# Altium schematic symbol library Schlib.SchLib: 18 symbols
Pins are listed as number, name and electrical type; pins without a type are passive.

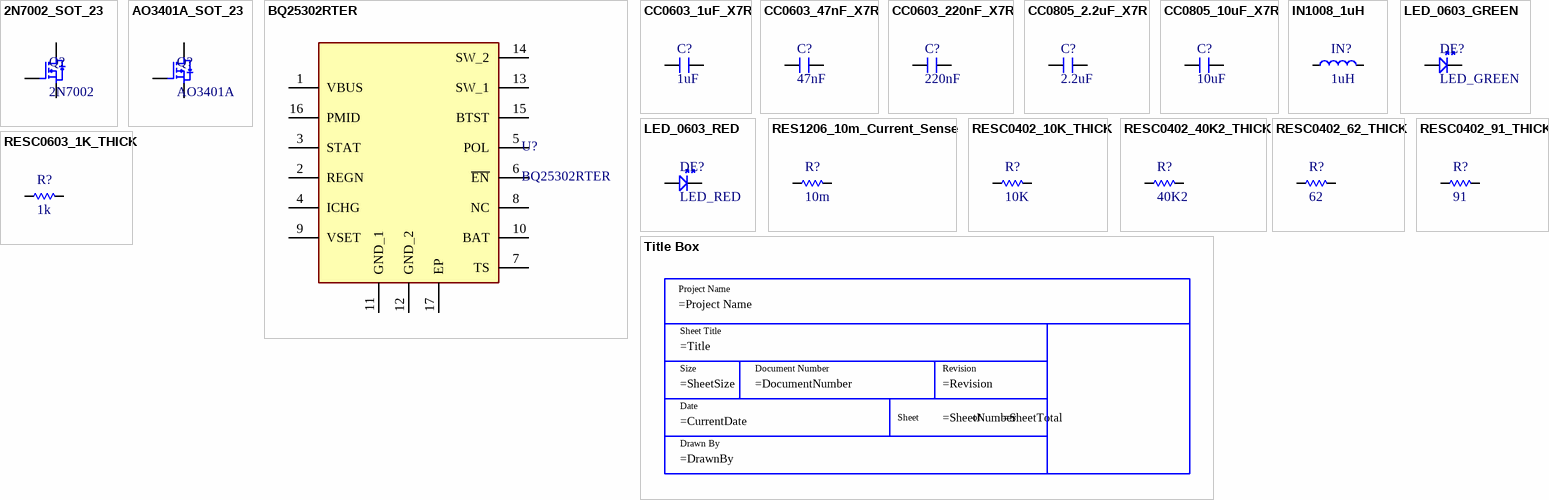
[diagram p0: symbols 2N7002_SOT_23 to Title Box]

## 2N7002_SOT_23
designator Q?, comment 2N7002
C916396, 2N7002, -55℃~+150℃ 1 N-channel 1.7Ω@5V 115mA 2.5V 200mW 50pF 5pF 60V SOT-23 MOSFETs ROHS; Supplier 1: LCSC; Supplier Part Number 1: C916396
footprint SOT95P240X115-3N (SOT23, 3-Leads, Body 2.90x2.40mm, Pitch 0.95mm, IPC Medium Density)
pins: 1 G, 2 S, 3 D

## AO3401A_SOT_23
designator Q?, comment AO3401A
C347476, AO3401A, -55℃~+150℃ 1 P-Channel 1.3V 1.4W 115pF 30V 4.2A 50mΩ@10V 77pF 9.4nC@4.5V 954pF P-Channel SOT-23 MOSFETs ROHS; Supplier 1: UnikeyIC; Supplier Part Number 1: AO3401A
footprint SOT95P240X115-3N (SOT23, 3-Leads, Body 2.90x2.40mm, Pitch 0.95mm, IPC Medium Density)
pins: 1 G, 2 S, 3 D

## BQ25302RTER
designator U?
C2761617, BQ25302RTER, -40℃~+85℃ 1 2A 4.4V 4uA 6.2V Charging IC Lithium Battery Support WQFN-16-EP(3x3) Battery Management ROHS; Manufacturer_Name: Texas Instruments; Datasheet Link: https://www.ti.com/lit/gpn/bq25302?HQS=ti-null-null-sf-df-pf-sep-wwe&DCM=yes; Height: 0.8mm; Manufacturer_Part_Number: BQ25302RTER; Mouser Part Number: 595-BQ25302RTER; Mouser Price/Stock: https://www.mouser.co.uk/ProductDetail/Texas-Instruments/BQ25302RTER?qs=T94vaHKWudT5T0v43I60Mg%3D%3D; Arrow Part Number: BQ25302RTER; Arrow Price/Stock: null?region=nac; Supplier 1: Mouser; Supplier Part Number 1: 595-BQ25302RTER; Supplier 2: Mouser; Supplier Part Number 2: 595-BQ25302RTER
footprint QFN50P300X300X80_HS-17N (QFN, 16-Leads, Body 3.00x3.00mm, Pitch 0.50mm, Thermal Pad 1.68x1.68mm, IPC Medium Density)
pins: 1 VBUS, 2 REGN, 3 STAT, 4 ICHG, 5 POL, 6 ~{EN}, 7 TS, 8 NC, 9 VSET, 10 BAT, 11 GND_1, 12 GND_2, 13 SW_1, 14 SW_2, 15 BTST, 16 PMID, 17 EP

## CC0603_1uF_X7R
designator C?, comment 1uF
C380328, TCC0603X7R105K250CT, 1uF 25V X7R ±10% 0603 Multilayer Ceramic Capacitors MLCC - SMD/SMT ROHS; Supplier 1: UnikeyIC; Supplier Part Number 1: TCC0603X7R105K250CT
footprint CAPC1608X08N (Chip Capacitor, 2-Leads, Body 1.60x0.80mm, IPC Medium Density)
pins: 1, 2

## CC0603_47nF_X7R
designator C?, comment 47nF
C519546, CC0603JRX7R8BB473, 25V 47nF X7R ±5% 0603 Multilayer Ceramic Capacitors MLCC - SMD/SMT ROHS; Supplier 1: element14 APAC; Supplier Part Number 1: CC0603JRX7R8BB473
footprint CAPC1608X08N (Chip Capacitor, 2-Leads, Body 1.60x0.80mm, IPC Medium Density)
pins: 1, 2

## CC0603_220nF_X7R
designator C?, comment 220nF
C21120, CL10B224KA8NNNC, 220nF 25V X7R ±10% 0603 Multilayer Ceramic Capacitors MLCC - SMD/SMT ROHS; Supplier 1: element14 APAC; Supplier Part Number 1: CL10B224KA8NNNC
footprint CAPC1608X08N (Chip Capacitor, 2-Leads, Body 1.60x0.80mm, IPC Medium Density)
pins: 1, 2

## CC0805_2.2uF_X7R
designator C?, comment 2.2uF
C19110 ,CL21B225KAFNNNE, 2.2uF 25V X7R ±10% 0805 Multilayer Ceramic Capacitors MLCC - SMD/SMT ROHS; Supplier 1: Avnet; Supplier Part Number 1: CL21B225KAFNNNE
footprint CAPC2012X12N (Chip Capacitor, 2-Leads, Body 2.00x1.25mm, IPC Medium Density)
pins: 1, 2

## CC0805_10uF_X7R
designator C?, comment 10uF
C95841, CL21B106KOQNNNE,  10uF 16V X7R ±10% 0805 Multilayer Ceramic Capacitors MLCC - SMD/SMT ROHS; Supplier 1: Future Electronics; Supplier Part Number 1: CL21B106KOQNNNE
footprint CAPC2012X14N (Chip Capacitor, 2-Leads, Body 2.00x1.25mm, IPC Medium Density)
pins: 1, 2

## IN1008_1uH
designator IN?, comment 1uH
C162587, LQM2HPN1R0MGHL, 1uH 2A 2A 50MHz 50mΩ Multilayer inductor ±20% 1008 Inductors (SMD) ROHS; Supplier 1: TTI; Supplier Part Number 1: LQM2HPN1R0MGHL
footprint INDC2520X09N (Chip Inductor, 2-Leads, Body 2.50x2.00mm, IPC Medium Density)
pins: 1, 2

## LED_0603_GREEN
designator DE?, comment LED_GREEN
C7496818, F.0603.00025/P2-0603G1TS2-06T-002, -40℃~+85℃ 120° 2.6V~2.9V 230mcd 30mA 517nm 520nm~525nm 90mW Discrete Diode Emerald Green 0603 LED Indication - Discrete ROHS; Supplier 1: element14 APAC; Supplier Part Number 1: 150060GS75000
footprint LED_1608X06N (Chip Diode, 2-Leads, Body 1.60x0.80mm, IPC Medium Density)
pins: 1 -, 2 +

## LED_0603_RED
designator DE?, comment LED_RED
C965799, XL-1608SURC-06, -40℃~+85℃ 120° 2.3V 20mA 225mcd 50mW 620nm~630nm 625nm Discrete Diode Red Top-mount Water Clear 0603 LED Indication - Discrete ROHS; Supplier 1: UnikeyIC; Supplier Part Number 1: XL-1608SURC-06
footprint LED_1608X06N (Chip Diode, 2-Leads, Body 1.60x0.80mm, IPC Medium Density)
pins: 1 -, 2 +

## RES1206_10m_Current_Sense
designator R?, comment 10m
C105362, FMF06FTHR010-LH, 10mΩ 1W Current Sense Resistor SMD ±1% ±70ppm/℃ 1206 Current Sense Resistors / Shunt Resistors ROHS; Supplier 1: DigiKey Marketplace; Supplier Part Number 1: 5440-FMF06FTHR010-LHMTR-ND
footprint RESC3116X08N (Chip Resistor, 2-Leads, Body 3.10x1.65mm, IPC Medium Density)
pins: 1, 2

## RESC0402_10K_THICK
designator R?, comment 10K
C60490, RC0402FR-0710KL, -55℃~+155℃ 10kΩ 50V 62.5mW Thick Film Resistor ±1% ±100ppm/℃ 0402 Chip Resistor - Surface Mount ROHS; Supplier 1: element14 APAC; Supplier Part Number 1: RC0402FR-0710KL
footprint RESC1005X04N (Chip Resistor, 2-Leads, Body 1.00x0.50mm, IPC Medium Density)
pins: 1, 2

## RESC0402_40K2_THICK
designator R?, comment 40K2
C137983, RC0402FR-0740K2L, -55℃~+155℃ 40.2kΩ 50V 62.5mW Thick Film Resistor ±1% ±100ppm/℃ 0402 Chip Resistor - Surface Mount ROHS; Supplier 1: element14 APAC; Supplier Part Number 1: RC0402FR-0740K2L
footprint RESC1005X04N (Chip Resistor, 2-Leads, Body 1.00x0.50mm, IPC Medium Density)
pins: 1, 2

## RESC0402_62_THICK
designator R?, comment 62
C274896, RC0402FR-0762RL, -55℃~+155℃ 50V 62.5mW 62Ω Thick Film Resistor ±1% ±100ppm/℃ 0402 Chip Resistor - Surface Mount ROHS; Supplier 1: element14 APAC; Supplier Part Number 1: RC0402FR-0762RL
footprint RESC1005X04N (Chip Resistor, 2-Leads, Body 1.00x0.50mm, IPC Medium Density)
pins: 1, 2

## RESC0402_91_THICK
designator R?, comment 91
C2998110, FRC0402F91R0TS, -55℃~+155℃ 50V 62.5mW 91Ω Thick Film Resistor ±1% ±100ppm/℃ 0402 Chip Resistor - Surface Mount ROHS; Supplier 1: UnikeyIC; Supplier Part Number 1: FRC0402F91R0TS
footprint RESC1005X04N (Chip Resistor, 2-Leads, Body 1.00x0.50mm, IPC Medium Density)
pins: 1, 2

## RESC0603_1K_THICK
designator R?, comment 1k
C115325, RS-03K1001FT, -55℃~+155℃ 100mW 1kΩ 50V Thick Film Resistor ±1% ±100ppm/℃ 0603 Chip Resistor - Surface Mount ROHS; Supplier 1: UnikeyIC; Supplier Part Number 1: RS-03K1001FT
footprint RESC1608X03N (Chip Resistor, 2-Leads, Body 1.60x0.80mm, IPC Medium Density)
pins: 1, 2

## Title Box
designator *  (value not drawn)  (graphical)
text: Project Name; Sheet Title; Size; Document Number; Revision; Date; Sheet; of; Drawn By